# Altium schematic symbol library 2020-06-27_14-21-05.SchLib: 2 symbols
Pins are listed as number, name and electrical type; pins without a type are passive.

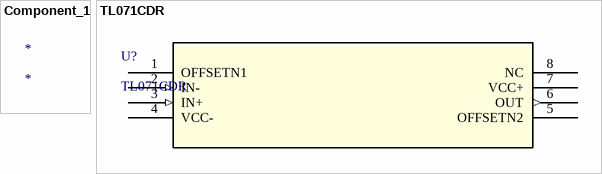
[diagram p0: symbols Component_1 to TL071CDR]

## Component_1
designator *

## TL071CDR
designator U?
No Description Available; Vendor: Texas Instruments; Built_By: EMA_UL_Team; Manufacturer_Part_Number: TL071CDR; Copyright: Copyright (C) 2018 Accelerated Designs. All rights reserved; RefDes: RefDes; Type: DEV
footprint D8
pins: 1 OFFSETN1, 2 IN- (in), 3 IN+ (in), 4 VCC- (power), 5 OFFSETN2, 6 OUT (out), 7 VCC+ (power), 8 NC